# Altium schematic symbol library GRM0335C1H1R0BA01J.SchLib: 1 symbol
Pins are listed as number, name and electrical type; pins without a type are passive.

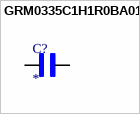
[diagram p0: symbol GRM0335C1H1R0BA01J]

## GRM0335C1H1R0BA01J
designator C?
SMD capacitor C0G(EIA) with capacitance 1.0pF Tol.0.1pF. Rated voltage 50Vdc 125C; MF: Murata; MP: GRM0335C1H1R0BA01J; SnapEDA_Link: https://www.snapeda.com/parts/GRM0335C1H1R0BA01J/Murata/view-part/?ref=snap; Package: 0603 Murata; Value: *; Check_prices: https://www.snapeda.com/parts/GRM0335C1H1R0BA01J/Murata/view-part/?ref=eda
footprint CAPC0603X33N
pins: 1, 2